# Altium footprint library CustomCase.PcbLib: 411 footprints (part 1 of 26)
Each footprint in its own frame and in the unit in brackets; x right, y up, seen from the top. Pads: shape width x height; smd on the part's side, far side on the other; paste and mask are expansions set on the pad; w line width, h text height; cw(c..) or ccw(c..) is an arc to the next point about the centre after c.
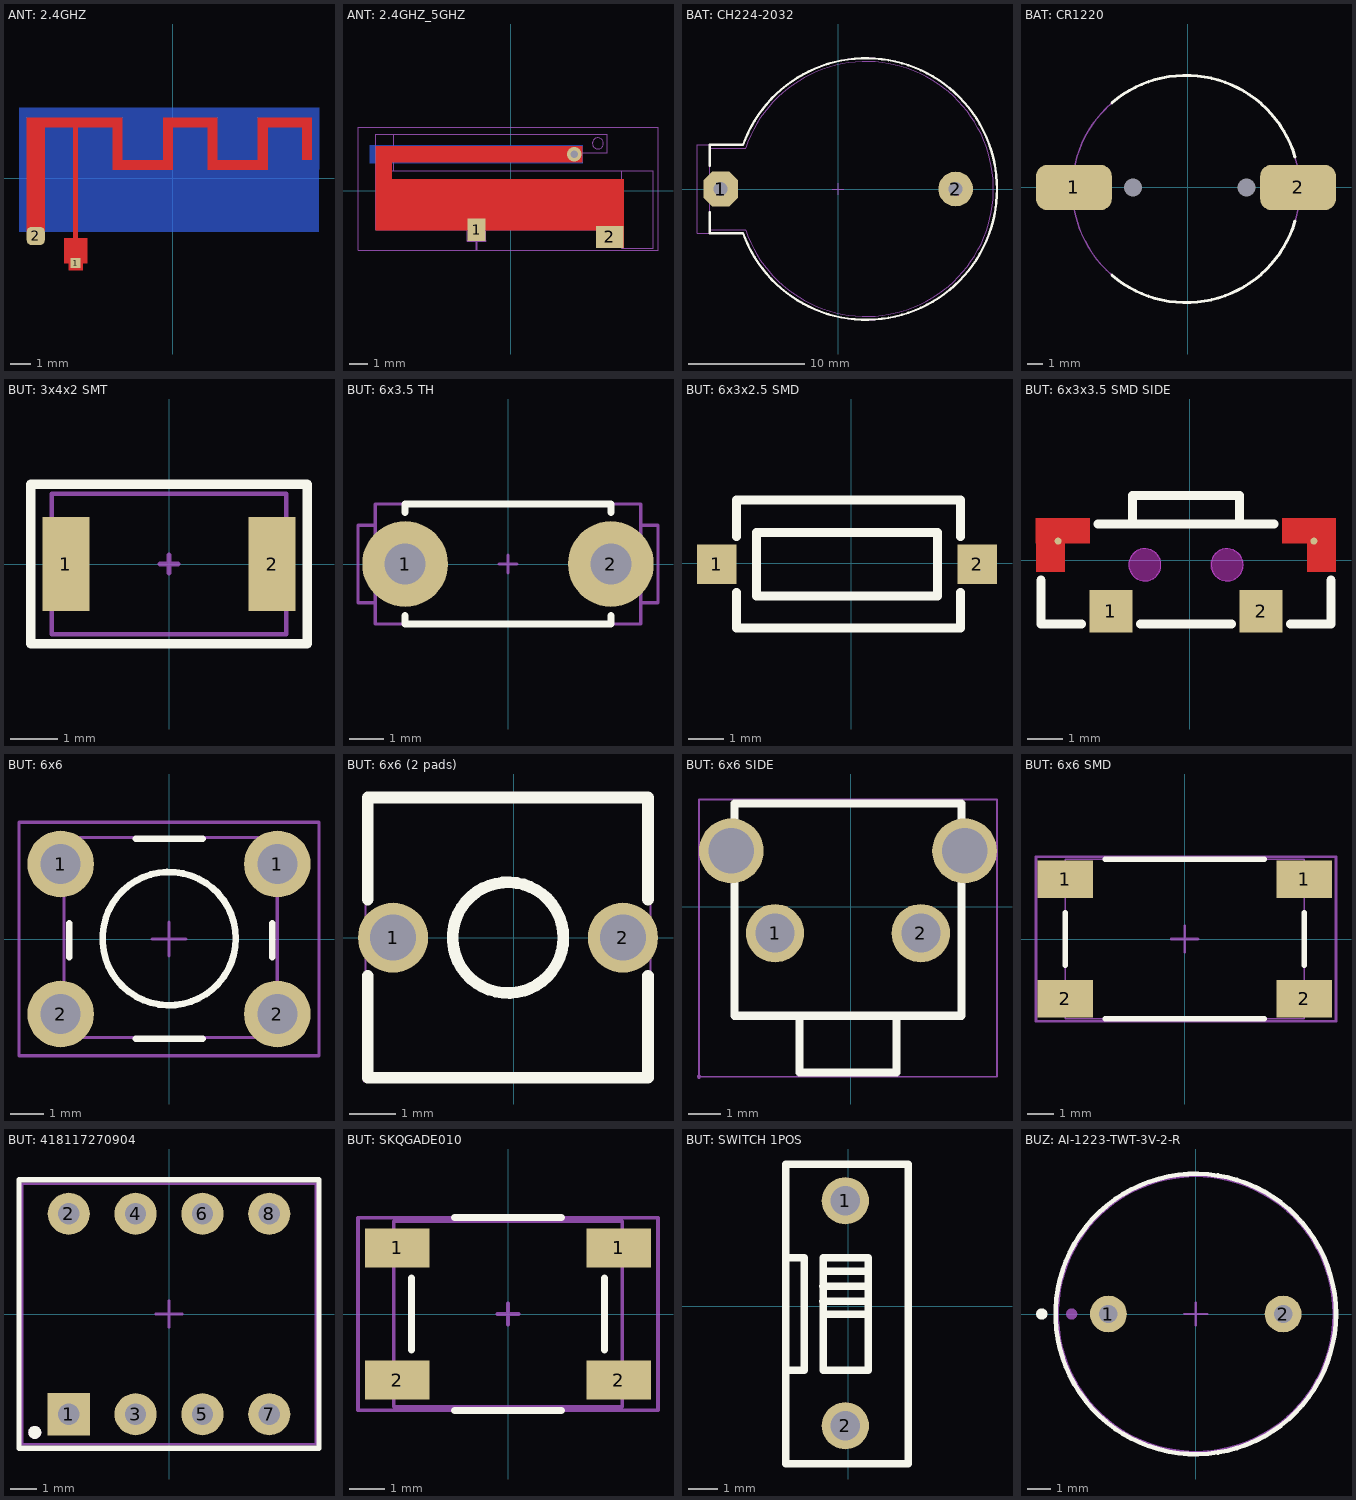
[diagram p0: the footprints below, top view; thin cyan lines are the x and y axes]

## ANT: 2.4GHZ [mm]
pads (2):
  rect 0.5x0.5 smd: 1(-4.844,-4.237)
  rrect50% 0.9x0.9 smd: 2(-6.832,-2.884)
Top Layer:
  rectangle: -7.287,-2.662 -6.381,3.034
  rectangle: -6.381,2.53 -2.502,3.034
  rectangle: -3.006,0.414 -2.502,3.013
  rectangle: -2.994,0.414 0.006,0.918
  rectangle: -0.487,0.414 0.016,2.53
  rectangle: -0.487,2.53 2.231,3.033
  rectangle: 1.729,0.414 2.231,2.53
  rectangle: 1.731,0.414 4.731,0.918
  rectangle: 4.248,0.414 4.751,3.013
  rectangle: 4.247,2.53 6.967,3.034
  rectangle: 6.464,0.918 6.967,3.013
  rectangle: -4.97,-3.011 -4.718,2.53
  pour cut-out: -5.419,-2.992 -4.269,-2.992 -4.269,-4.237 -5.419,-4.237
  region: -4.716,-2.987 -4.492,-3.771 -4.492,-4.588 -5.192,-4.588 -5.192,-3.763 -4.971,-2.987
Bottom Layer:
  pour cut-out: -7.669,3.508 7.306,3.508 7.306,-2.662 -7.669,-2.662

## ANT: 2.4GHZ_5GHZ [mm]
pads (2):
  rect 1x1.2 smd paste-3 mask+0.102: 1(-1.853,-2.134)
  rect 1.5x1.2 smd paste-3 mask+0.102: 2(5.397,-2.515)
via 3.467,1.98 diameter 0.8 hole 0.4
Top Layer:
  rectangle: 4.647,-3.125 6.167,0.635
  rectangle: -7.353,-2.165 4.647,0.635
  rectangle: -7.353,0.635 -6.463,2.425
  rectangle: -6.463,1.535 3.917,2.425
Bottom Layer:
  rectangle: -7.683,1.485 3.947,2.485
Bottom Assy:
  circle w0.013: c4.753,2.566 r0.3
  lines w0.013: -7.347,1.066 -7.347,3.066 -6.347,3.066 ; -7.347,1.066 -6.347,1.066 -6.347,3.066 ; -7.347,1.066 -7.347,-2.134 6.053,-2.134 6.053,1.066 ; -7.347,1.066 6.053,1.066 ; -6.347,3.066 -6.347,2.066 5.253,2.066 5.253,3.066 -6.347,3.066 ; 6.053,1.066 6.053,-3.134 7.753,-3.134 7.753,1.066 6.053,1.066 ; -2.347,-2.734 -2.347,-2.134 -1.347,-2.134 -1.347,-2.734 -2.347,-2.734
Size Area:
  lines w0.05: -8.303,-3.24 -8.303,3.435 8.022,3.435 8.022,-3.24 -8.303,-3.24
  lines w0.1: -2.353,-2.74 -1.353,-2.74 ; -1.853,-3.24 -1.853,-2.24

## BAT: CH224-2032 [mm] "пїЅпїЅпїЅпїЅпїЅпїЅпїЅпїЅпїЅпїЅ пїЅпїЅпїЅпїЅпїЅ пїЅпїЅпїЅ пїЅпїЅпїЅпїЅпїЅпїЅпїЅпїЅ 2032"
height 9
pads (2):
  oct 3x3 hole 1.2: 1(-10.151,0)
  round 3 hole 1.2: 2(10.152,0)
Top Overlay:
  lines w0.2: -11.1,-2 -11.1,-3.81 -8.255,-3.81 ; -11.1,2 -11.1,3.81 -8.255,3.81 ; -8.221,-3.798 ccw(c2.422,0) -8.221,3.798
Top Assy:
  lines w0.1: -7.992,-3.5 -11.1,-3.5 -11.1,3.5 -7.992,3.5 ; -7.989,-3.552 ccw(c2.422,0) -7.989,3.552
Size Area:
  lines w0.1: -8.255,-3.81 -12.192,-3.81 -12.192,3.81 -8.255,3.81 ; -8.221,-3.798 ccw(c2.422,0) -8.221,3.798 ; -0.5,0 0.5,0 ; 0,-0.5 0,0.5
3D body "CH224-2032.step": height 8.5, standoff -4, extent -11.079,-11 13.421,11

## BAT: CR1220 [mm]
pads (4):
  rrect50% 5x3 smd mask+0.075: 1(-7.5,0) 2(7.3,0)
  round 0 hole 1.2 mask+0.075: MH(-3.6,0) MH(3.9,0)
Top Overlay:
  lines w0.2: -4.997,-5.781 ccw(c-0.1,-0.1) 7.1,-2.2 ; -4.997,5.581 cw(c-0.1,-0.1) 7.1,2
Top Assy:
  lines w0.1: -5.002,-5.776 cw(c-0.1,-0.1) -4.997,-5.781
3D body "ALSRobot-CR1220.STEP": height 4.04, standoff -0.9, extent -9.35,-7.6 9.15,7.397
3D body "User Library-CR1220-2.STEP": height 3.6, standoff 1.6, extent -6.175,-6.175 6.225,6.225

## BUT: 3x4x2 SMT [mm]
pads (2):
  rect 1x2 smd: 1(-2.2,0) 2(2.2,0)
Top Overlay:
  lines w0.2: -2.95,-1.7 2.95,-1.7 2.95,1.7 -2.95,1.7 -2.95,-1.7
Top Assy:
  lines w0.1: -2.5,-1.5 -2.5,1.5 2.5,1.5 2.5,-1.5 -2.5,-1.5
Size Area:
  lines w0.1: -0.2,0 0.2,0 ; 0,-0.2 0,0.2 ; -2.95,-1.7 -2.95,1.7 2.95,1.7 2.95,-1.7 -2.95,-1.7
3D body "User Library-Pushbutton3x4x2.step": height 2, standoff 0, extent -2.45,-1.45 2.45,1.45

## BUT: 6x3.5 TH [mm]
pads (2):
  round 2.5 hole 1.2 mask+0.075: 1(-3,0) 2(3,0)
Top Overlay:
  lines w0.2: -3,-1.5 -3,-1.75 3,-1.75 ; -3,1.5 -3,1.75 3,1.75 ; 3,-1.7 3,-1.5 ; 3,1.5 3,1.7
Top Assy:
  lines w0.1: -3.875,-1.75 -3.875,1.75 3.875,1.75 3.875,-1.75 -3.875,-1.75
Size Area:
  lines w0.1: -0.25,0 0.25,0 ; 0,-0.25 0,0.25 ; -4.375,-1.125 -3.875,-1.125 -3.875,-1.75 3.875,-1.75 3.875,-1.125 4.375,-1.125 4.375,1.125 3.875,1.125 3.875,1.75 -3.875,1.75 -3.875,1.125 -4.375,1.125 -4.375,-1.125
3D body "User Library-DTS-32.STEP": height 5.1, standoff -3.41, extent -3.878,-1.75 3.878,1.75

## BUT: 6x3x2.5 SMD [mm]
pads (2):
  rect 1.1x1.1 smd: 1(-3.768,-0.025) 2(3.532,-0.025)
Top Overlay:
  lines w0.254: -3.218,-0.806 -3.218,-1.803 3.057,-1.803 3.057,-0.806 ; -3.218,0.756 -3.218,1.775 2.982,1.775 ; 3.057,0.756 3.057,1.775 ; -2.658,-0.914 -2.658,0.864 2.422,0.864 2.422,-0.914 -2.658,-0.914
3D body "Tactile_SMD_3x6x2.5mm.STEP": height 2.51, standoff 0, extent -4.126,-1.854 3.926,1.804

## BUT: 6x3x3.5 SMD SIDE [mm]
pads (4):
  rect 1.2x1.2 smd: 1(-2.199,-1.425) 2(2.001,-1.425)
  round 0.194 smd: 3(3.483,0.541) 4(-3.682,0.541)
Top Layer:
  region: -4.299,1.175 -4.299,0.475 -4.299,-0.325 -3.499,-0.325 -3.499,0.475 -2.799,0.475 -2.799,1.175 -3.499,1.175 -4.299,1.175
  region: 4.101,0.475 4.101,1.175 2.601,1.175 2.601,0.475 3.3,0.475 3.3,-0.325 4.1,-0.325 4.1,0.475
Top Overlay:
  lines w0.254: -4.163,-0.556 -4.163,-1.778 -3.031,-1.778 ; -2.568,1.018 -0.099,1.018 2.369,1.018 ; -1.599,1.018 -1.599,1.822 1.401,1.822 1.401,1.018 ; -1.368,-1.778 -0.099,-1.778 1.169,-1.778 ; 2.832,-1.778 3.965,-1.778 3.965,-0.556
Keep-Out Layer:
  board cut-out: 1.5,-0.125 1.5,-0.215 1.432,-0.38 1.305,-0.507 1.14,-0.575 0.961,-0.575 0.796,-0.507 0.669,-0.38 0.6,-0.215 0.6,-0.125 0.6,-0.036 0.669,0.13 0.796,0.256 0.961,0.325 1.14,0.325 1.305,0.256 1.432,0.13 1.5,-0.036
  board cut-out: -0.8,-0.125 -0.8,-0.215 -0.868,-0.38 -0.995,-0.507 -1.16,-0.575 -1.339,-0.575 -1.504,-0.507 -1.631,-0.38 -1.7,-0.215 -1.7,-0.125 -1.7,-0.036 -1.631,0.13 -1.504,0.256 -1.339,0.325 -1.16,0.325 -0.995,0.256 -0.868,0.13 -0.8,-0.036
Keep-Out Layer:
  circle w0.003: c1.05,-0.125 r0.45
  circle w0.003: c-1.25,-0.125 r0.45
  region: 1.5,-0.125 1.491,-0.219 1.462,-0.308 1.415,-0.39 1.352,-0.46 1.275,-0.515 1.19,-0.553 1.097,-0.573 1.003,-0.573 0.911,-0.553 0.825,-0.515 0.749,-0.46 0.686,-0.39 0.639,-0.308 0.61,-0.219 0.6,-0.125 0.61,-0.032 0.639,0.058 0.686,0.139 0.749,0.209 0.825,0.265 0.911,0.303 1.003,0.322 1.097,0.322 1.19,0.303 1.275,0.265 1.352,0.209 1.415,0.139 1.462,0.058 1.491,-0.032
  region: 1.5,-0.125 1.5,-0.215 1.432,-0.38 1.305,-0.507 1.14,-0.575 0.961,-0.575 0.796,-0.507 0.669,-0.38 0.6,-0.215 0.6,-0.125 0.6,-0.036 0.669,0.13 0.796,0.256 0.961,0.325 1.14,0.325 1.305,0.256 1.432,0.13 1.5,-0.036
  region: -0.8,-0.125 -0.809,-0.219 -0.838,-0.308 -0.885,-0.39 -0.948,-0.46 -1.025,-0.515 -1.11,-0.553 -1.202,-0.573 -1.297,-0.573 -1.389,-0.553 -1.475,-0.515 -1.551,-0.46 -1.614,-0.39 -1.661,-0.308 -1.69,-0.219 -1.7,-0.125 -1.69,-0.032 -1.661,0.058 -1.614,0.139 -1.551,0.209 -1.475,0.265 -1.389,0.303 -1.297,0.322 -1.202,0.322 -1.11,0.303 -1.025,0.265 -0.948,0.209 -0.885,0.139 -0.838,0.058 -0.809,-0.032
  region: -0.8,-0.125 -0.8,-0.215 -0.868,-0.38 -0.995,-0.507 -1.16,-0.575 -1.339,-0.575 -1.504,-0.507 -1.631,-0.38 -1.7,-0.215 -1.7,-0.125 -1.7,-0.036 -1.631,0.13 -1.504,0.256 -1.339,0.325 -1.16,0.325 -0.995,0.256 -0.868,0.13 -0.8,-0.036
Top Assy:
  circle w0.003: c1.05,-0.125 r0.45
  circle w0.003: c-1.25,-0.125 r0.45
3D body "TL 3330 Tactile Button.stp": height 3.5, standoff 0, extent -3.999,-1.778 3.801,1.697

## BUT: 6x6 [mm] "Leaded Tactile Button 6x6"
height 5
pads (4):
  round 2 hole 1.2: 1(-3.25,2.25) 1(3.25,2.25) 2(-3.25,-2.25) 2(3.25,-2.25)
Top Overlay:
  circle w0.2: c0.004,0.012 r2
  lines w0.2: -2.996,-0.544 -2.996,0.472 ; -0.996,-2.988 1.004,-2.988 ; -0.996,3.012 1.004,3.012 ; 3.1,-0.544 3.1,0.472
Top Assy:
  lines w0.1: -3.148,-2.957 3.252,-2.957 3.252,3.043 -3.148,3.043 -3.148,-2.957
Size Area:
  lines w0.1: -0.5,0 0.5,0 ; 0,-0.5 0,0.5 ; -4.5,-3.5 -4.5,3.5 4.5,3.5 4.5,-3.5 -4.5,-3.5
3D body "������_��������_6�6�1.STEP": height 4.5, standoff -0.9, extent -3.148,-2.957 3.252,3.043

## BUT: 6x6 (2 pads) [mil]
pads (2):
  round 60 hole 39.4: 1(-103.47,-0.13) 2(93.43,-0.13)
Top Overlay:
  lines w10: -125.07,-32.73 -125.07,-120.13 114.93,-120.13 114.93,-32.73 114.93,-45.83 ; -125.07,32.47 -125.07,119.87 114.93,119.87 114.93,32.47 ; -52.37,-3.13 -52.37,2.87 -51.57,8.97 -50.07,14.87 -47.77,20.47 -44.77,25.77 -41.17,30.67 -36.97,34.97 -32.17,38.77 -26.97,41.97 -21.47,44.37 -15.57,46.07 -9.57,47.07 -3.47,47.27 2.53,46.67 8.43,45.37 14.13,43.27 19.53,40.47 24.53,36.97 29.03,32.87 32.93,28.27 36.33,23.17 38.93,17.67 40.83,11.87 42.03,5.97 42.43,-0.13 42.03,-6.23 40.83,-12.13 38.93,-17.93 36.33,-23.43 32.93,-28.53 29.03,-33.13 24.53,-37.23 19.53,-40.73 14.13,-43.53 8.43,-45.63 2.53,-46.93 -3.47,-47.53 -9.57,-47.33 -15.57,-46.33 -21.47,-44.63 -26.97,-42.13 -32.17,-39.03 -36.97,-35.23 -41.17,-30.83 -44.77,-26.03 -47.77,-20.73 -50.07,-15.03 -51.57,-9.23 -52.37,-3.13
Mechanical 6:
  lines w2: -127.07,-122.13 117.03,-122.13 117.03,121.97 -127.07,121.97 -127.07,-122.13
Mechanical 8:
  region: -124.77,-122.13 -125.07,-123.43 -126.07,-124.33 -127.47,-124.53 -128.67,-123.93 -129.37,-122.83 -129.37,-121.53 -128.67,-120.43 -127.47,-119.83 -126.07,-120.03 -125.07,-120.93
Top Designator:
  region: -115.27,5.77 -91.67,5.77 -91.67,-6.03 -115.27,-6.03
  region: 81.53,5.77 105.23,5.77 105.23,-6.03 81.53,-6.03
3D body "������_��������_6�6�1.STEP": height 177.17, standoff -35.43, extent -130.79,-117.95 121.18,118.27

## BUT: 6x6 SIDE [mm]
pads (4):
  round 1.8 hole 1.2: 1(-2.34,-0.822) 2(2.161,-0.822)
  round 2 hole 1.4: ""(-3.689,1.718) ""(3.509,1.718)
Top Overlay:
  lines w0.254: -1.59,-3.372 -1.59,-5.122 1.41,-5.122 1.41,-3.372 ; -3.59,-3.372 3.41,-3.372 3.41,3.178 -3.59,3.178 -3.59,-3.372
Size Area:
  region: -4.629,-5.249 -4.629,-5.274 -4.664,-5.309 -4.714,-5.309 -4.749,-5.274 -4.749,-5.249 -4.749,-5.224 -4.714,-5.189 -4.664,-5.189 -4.629,-5.224
  region: -1.84,-0.822 -1.84,-0.921 -1.916,-1.105 -2.057,-1.246 -2.241,-1.322 -2.44,-1.322 -2.623,-1.246 -2.764,-1.105 -2.84,-0.921 -2.84,-0.822 -2.84,-0.723 -2.764,-0.539 -2.623,-0.398 -2.44,-0.322 -2.241,-0.322 -2.057,-0.398 -1.916,-0.539 -1.84,-0.723
  region: 2.66,-0.822 2.66,-0.921 2.584,-1.105 2.444,-1.246 2.26,-1.322 2.061,-1.322 1.877,-1.246 1.737,-1.105 1.661,-0.921 1.661,-0.822 1.661,-0.723 1.737,-0.539 1.877,-0.398 2.061,-0.322 2.26,-0.322 2.444,-0.398 2.584,-0.539 2.66,-0.723
  region: 4.109,1.718 4.109,1.599 4.018,1.378 3.849,1.209 3.629,1.118 3.39,1.118 3.169,1.209 3.001,1.378 2.909,1.599 2.909,1.718 2.909,1.837 3.001,2.058 3.169,2.227 3.39,2.318 3.629,2.318 3.849,2.227 4.018,2.058 4.109,1.837
  region: -3.089,1.718 -3.089,1.599 -3.18,1.378 -3.349,1.209 -3.57,1.118 -3.808,1.118 -4.029,1.209 -4.198,1.378 -4.289,1.599 -4.289,1.718 -4.289,1.837 -4.198,2.058 -4.029,2.227 -3.808,2.318 -3.57,2.318 -3.349,2.227 -3.18,2.058 -3.089,1.837
  lines w0.051: -4.689,-5.249 4.509,-5.249 4.509,3.305 -4.689,3.305 -4.689,-5.249
3D body "SW-TH_K2-1102AQ-C4CW-01.stp": height 7.4, standoff -3.5, extent -4.439,-4.672 4.261,3.178

## BUT: 6x6 SMD [mm] "Leaded Tactile Button 6x6"
height 9
pads (4):
  rect 2.1x1.4 smd: 1(-4.5,2.25) 1(4.5,2.25) 2(-4.5,-2.25) 2(4.5,-2.25)
Top Overlay:
  lines w0.2: -4.5,-1 -4.5,1 ; -3,-3 3,-3 ; -3,3 3,3 ; 4.5,-1 4.5,1
Top Assy:
  lines w0.05: -4.5,-3 -4.5,3 4.5,3 4.5,-3 -4.5,-3
Size Area:
  lines w0.1: -0.5,0 0.5,0 ; 0,-0.5 0,0.5 ; -5.6,-3.1 5.7,-3.1 5.7,3.1 -5.6,3.1 -5.6,-3.1
3D body "User Library-PTS645SL43SMTR92-LFS.STEP": height 4.3, standoff 0, extent -4.5,-3 4.5,3

## BUT: 418117270904 [mm]
pads (10):
  rect 1.6x1.6 hole 0.8: 1(-3.81,-3.81)
  round 1.6 hole 0.8: 2(-3.81,3.81) 3(-1.27,-3.81) 4(-1.27,3.81) 5(1.27,-3.81) 6(1.27,3.81) 7(3.81,-3.81) 8(3.81,3.81)
  round 0.5 on Mech1: ""(-5.1,-4.5)
  round 0.5 on Top Overlay: ""(-5.1,-4.5)
Top Overlay:
  lines w0.2: -5.7,-5.1 -5.7,5.1 5.7,5.1 5.7,-5.1 -5.7,-5.1
Top Assy:
  lines w0.1: -5.58,-4.95 -5.58,4.95 5.58,4.95 5.58,-4.95 -5.58,-4.95
Size Area:
  lines w0.1: -0.5,0 0.5,0 ; 0,-0.5 0,0.5 ; -5.7,-5.1 -5.7,5.1 5.7,5.1 5.7,-5.1 -5.7,-5.1
3D body "418117270904 (rev1).stp": height 6.9, standoff -3.65, extent -5.58,-4.95 5.58,4.95

## BUT: SKQGADE010 [mm]
pads (4):
  rect 1.8x1.1 smd: 1(-3.1,1.85) 1(3.1,1.85) 2(-3.1,-1.85) 2(3.1,-1.85)
Top Overlay:
  lines w0.2: -2.7,-1 -2.7,1 ; -1.5,-2.7 1.5,-2.7 ; -1.5,2.7 1.5,2.7 ; 2.7,-1 2.7,1
Top Assy:
  lines w0.1: -3.2,-2.6 3.2,-2.6 3.2,2.6 -3.2,2.6 -3.2,-2.6
Size Area:
  lines w0.1: -0.3,0 0.3,0 ; 0,-0.3 0,0.3 ; -4.2,-2.7 4.2,-2.7 4.2,2.7 -4.2,2.7 -4.2,-2.7
3D body "User Library-4x4_SMD_Switch.STEP": height 1.45, standoff -0.05, extent -3.2,-2.6 3.2,2.6

## BUT: SWITCH 1POS [mm]
pads (2):
  round 1.6 hole 1: 1(-0.099,3.58) 2(-0.099,-4.04)
Top Overlay:
  lines w0.254: -2.121,1.649 -1.486,1.649 -1.486,-2.161 -2.121,-2.161 ; -0.86,0.184 0.54,0.184 ; -0.86,0.684 0.54,0.684 ; -0.819,-0.256 0.581,-0.256 ; -0.801,1.184 0.599,1.184 ; -2.121,-2.161 -2.121,4.824 2.034,4.824 2.034,-5.336 -2.121,-5.336 -2.121,-2.161 ; -0.851,-2.161 -0.851,1.649 0.673,1.649 0.673,-2.161 -0.851,-2.161
Size Area:
  text "1" at -0.277,-2.615 h0.51
3D body: height 5.04, standoff 0, extent -2.122,-5.336 2.034,4.824

## BUZ: AI-1223-TWT-3V-2-R [mm]
pads (4):
  round 1.6 hole 0.8: 1(-3.8,0) 2(3.8,0)
  round 0.5 on Top Overlay: ""(-6.7,0)
  round 0.5 on Mech1: ""(-5.4,0)
Top Overlay:
  circle w0.2: c0,0 r6.1
Top Assy:
  circle w0.1: c0,0 r6
Size Area:
  circle w0.1: c0,0 r6
  lines w0.1: -0.5,0 0.5,0 ; 0,-0.5 0,0.5
3D body "AI-1223-TWT-3V-2-R.STEP": height 7.55, standoff -2, extent -6,-6 6,6